# Altium footprint library SamacSys.PcbLib: 1008 footprints (part 61 of 63)
Each footprint in its own frame and in the unit in brackets; x right, y up, seen from the top. Pads: shape width x height; smd on the part's side, far side on the other; paste and mask are expansions set on the pad; w line width, h text height; cw(c..) or ccw(c..) is an arc to the next point about the centre after c.
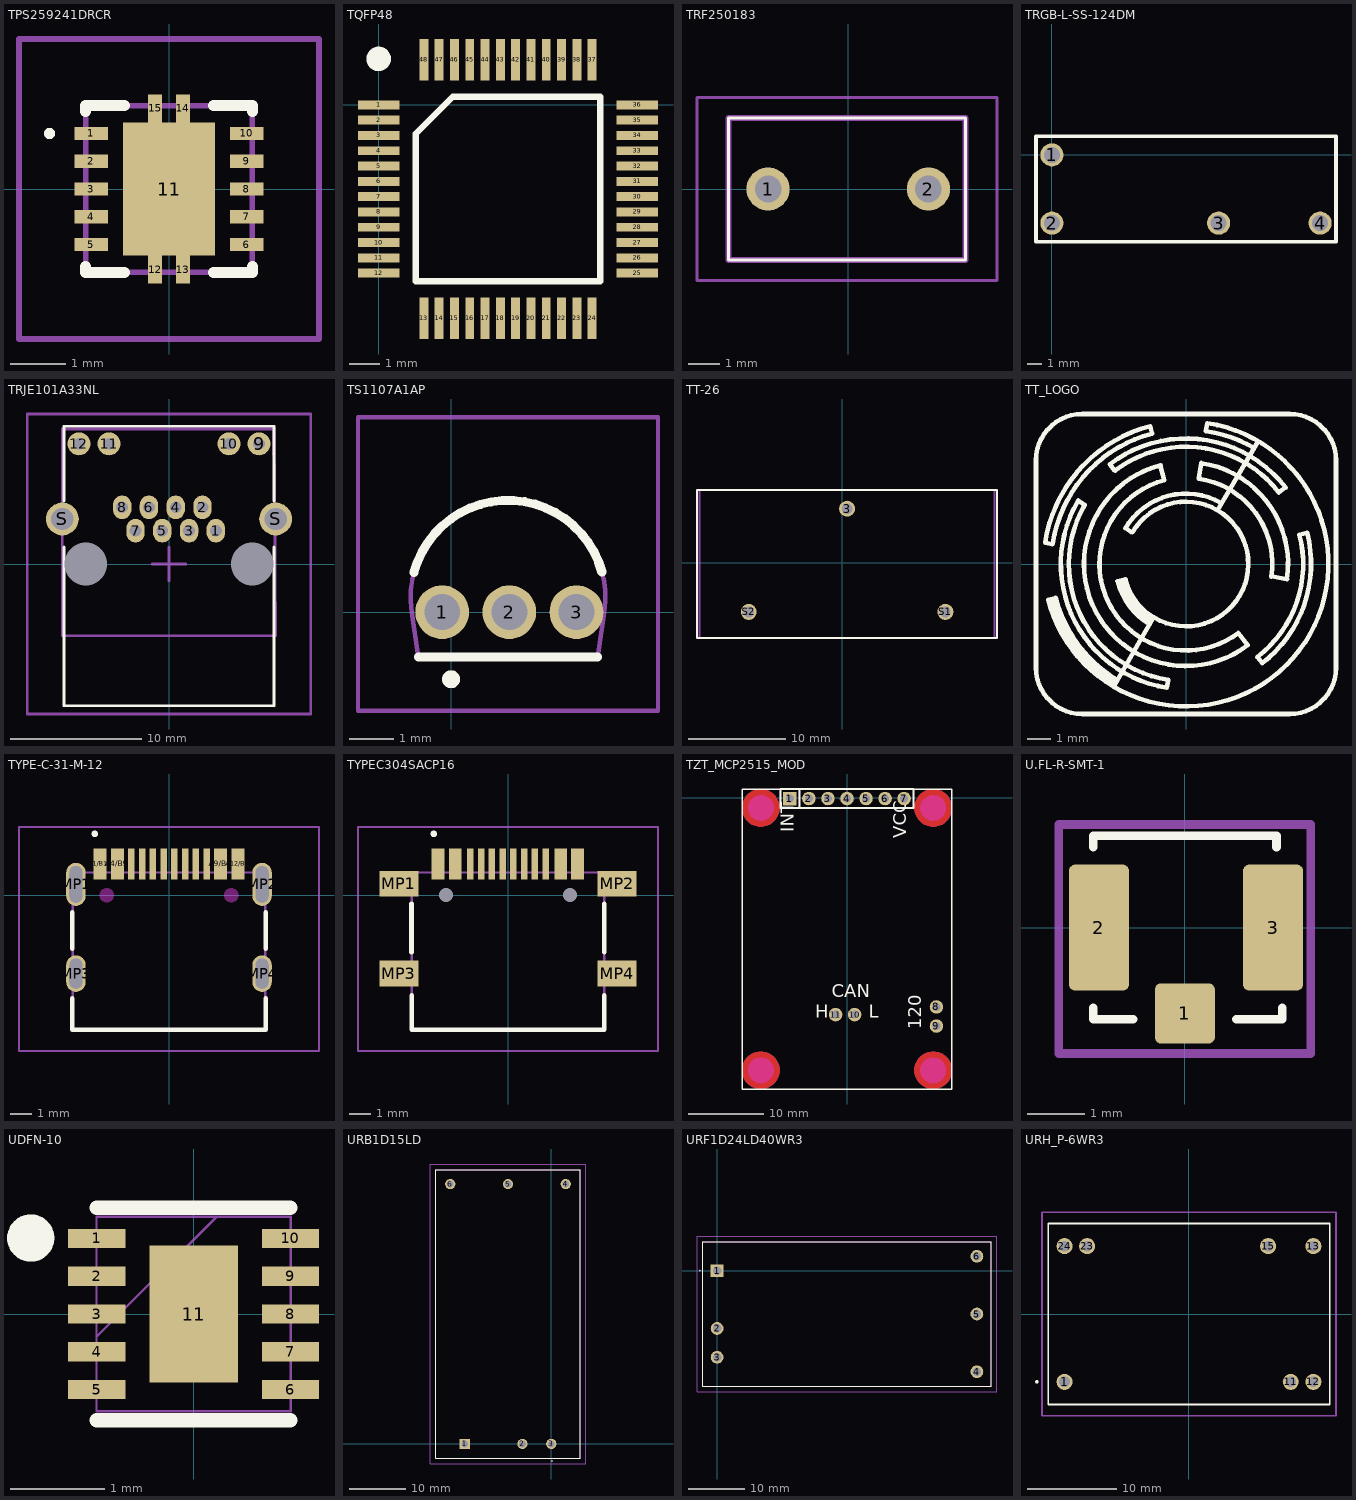
[diagram p60: the footprints below, top view; thin cyan lines are the x and y axes]

## TPS259241DRCR [mm]
pads (15):
  rect 0.6x0.24 smd: 1(-1.4,1) 2(-1.4,0.5) 3(-1.4,0) 4(-1.4,-0.5) 5(-1.4,-1) 6(1.4,-1) 7(1.4,-0.5) 8(1.4,0) 9(1.4,0.5) 10(1.4,1)
  rect 1.65x2.4 smd: 11(0,0)
  rect 0.25x0.5 smd: 12(-0.25,-1.45) 13(0.25,-1.45) 14(0.25,1.45) 15(-0.25,1.45)
Top Overlay:
  lines w0.1: -2.2,1 cw(c-2.15,1) -2.1,1 cw(c-2.15,1) -2.2,1
  lines w0.2: -1.5,-1.4 -1.5,-1.5 -0.8,-1.5 ; -1.5,1.4 -1.5,1.5 -0.8,1.5 ; 0.8,-1.5 1.5,-1.5 1.5,-1.4 ; 0.8,1.5 1.5,1.5 1.5,1.4
Assembly:
  lines w0.1: -1.5,-1.5 -1.5,1.5 1.5,1.5 1.5,-1.5 -1.5,-1.5
Countryard:
  lines w0.1: -2.7,-2.7 -2.7,2.7 2.7,2.7 2.7,-2.7 -2.7,-2.7
3D body "TPS51200DRCT.stp": height 1, standoff 0, extent -1.5,-1.5 1.5,1.5

## TQFP48 [mm]
pads (48):
  rect 1.35x0.29 smd: 1(0,0) 2(0,-0.5) 3(0,-1) 4(0,-1.5) 5(0,-2) 6(0,-2.5) 7(0,-3) 8(0,-3.5) 9(0,-4) 10(0,-4.5) 11(0,-5) 12(0,-5.5) 25(8.45,-5.5) 26(8.45,-5) 27(8.45,-4.5) 28(8.45,-4) 29(8.45,-3.5) 30(8.45,-3) 31(8.45,-2.5) 32(8.45,-2) 33(8.45,-1.5) 34(8.45,-1) 35(8.45,-0.5) 36(8.45,0)
  rect 0.29x1.35 smd: 13(1.475,-6.975) 14(1.975,-6.975) 15(2.475,-6.975) 16(2.975,-6.975) 17(3.475,-6.975) 18(3.975,-6.975) 19(4.475,-6.975) 20(4.975,-6.975) 21(5.475,-6.975) 22(5.975,-6.975) 23(6.475,-6.975) 24(6.975,-6.975) 37(6.975,1.475) 38(6.475,1.475) 39(5.975,1.475) 40(5.475,1.475) 41(4.975,1.475) 42(4.475,1.475) 43(3.975,1.475) 44(3.475,1.475) 45(2.975,1.475) 46(2.475,1.475) 47(1.975,1.475) 48(1.475,1.475)
Top Overlay:
  circle w0.4: c0,1.5 r0.2
  lines w0.2: 1.21,-5.765 7.24,-5.765 7.24,0.265 2.42,0.265 1.21,-0.945 1.21,-5.765
3D body "User Library-P-LQFP48-7x7-0_50.step": height 1.45, standoff 0, extent -0.28,-7.25 8.72,1.75

## TRF250183 [mm]
pads (2):
  round 1.365 hole 0.84: 1(-2.54,0) 2(2.54,0)
Top Overlay:
  lines w0.1: -3.79,-2.25 3.71,-2.25 3.71,2.25 -3.79,2.25 -3.79,-2.25
Assembly:
  lines w0.2: -3.79,-2.25 3.71,-2.25 3.71,2.25 -3.79,2.25 -3.79,-2.25
Countryard:
  lines w0.1: -4.79,-2.9 4.71,-2.9 4.71,2.9 -4.79,2.9 -4.79,-2.9
3D body "TRF250-183.stp": height 10.6, standoff -5, extent -3.79,-1.9 3.71,1.9

## TRGB-L-SS-124DM [mm]
pads (4):
  round 1.6 hole 1.1: 1(0,0) 2(0,-4.7) 3(11.5,-4.7) 4(18.5,-4.7)
Top Overlay:
  lines w0.254: -1.1,-6 -1.1,1.3 19.6,1.3 19.6,-6 -1.1,-6
3D body: height 15.6, standoff 0, extent -1.1,-6 19.6,1.3

## TRJE101A33NL [mm] "Modular Jack"
height 13.55
pads (16):
  oval 1.4x1.8 hole 0.9: 1(3.57,2.54) 2(2.55,4.32) 3(1.53,2.54) 4(0.51,4.32) 5(-0.51,2.54) 6(-1.53,4.32) 7(-2.55,2.54) 8(-3.57,4.32)
  round 1.75 hole 0.9: 9(6.86,9.16) 10(4.57,9.16) 11(-4.57,9.16) 12(-6.86,9.16)
  round 0 hole 3.25 unplated: M(-6.35,0) M(6.35,0)
  round 2.5 hole 1.7: S(-8.125,3.43) S(8.125,3.43)
Top Overlay:
  lines w0.2: -8,1.3 -8,-10.8 8,-10.8 8,1.3 ; -8,4.8 -8,10.5 0,10.5 8,10.5 8,4.8
3D Body:
  lines w0.2: -8.125,-5.46 -8.125,10.29 ; -8,-5.46 8,-5.46 ; -8,10.29 8,10.29 8.125,-5.46
Countryard:
  lines w0.2: -1.27,0 1.27,0 ; 0,-1.27 0,1.27 ; -10.795,-11.43 -10.795,11.43 10.795,11.43 10.795,-11.43 -10.795,-11.43

## TS1107A1AP [mm]
pads (3):
  round 1.2 hole 0.8: 1(-0.2,0) 2(1.3,0) 3(2.8,0)
Top Overlay:
  lines w0.2: -0.831,0.882 cw(c1.271,0.323) 3.369,0.892 ; -0.73,-1 3.27,-1 ; -0.1,-1.5 ccw(c0,-1.5) 0.1,-1.5 ccw(c0,-1.5) -0.1,-1.5
Assembly:
  lines w0.1: -0.88,-0.003 cw(c1.271,0.323) 3.421,0.001 ; -0.88,0 -0.73,-1 3.27,-1 3.42,0
Countryard:
  lines w0.1: -2.08,-2.2 4.62,-2.2 4.62,4.35 -2.08,4.35 -2.08,-2.2
3D body "2n3904.stp": height 4.45, standoff -12.65, extent -1.03,-1.351 3.67,2.35

## TT-26 [mm]
height 26
pads (3):
  round 1.65 hole 1.1: 3(0.508,5.588) S1(10.668,-5.08) S2(-9.652,-5.08)
Top Overlay:
  lines w0.2: -15,-7.75 16,-7.75 16,7.5 -15,7.5 -15,-7.75
Top Assembly:
  lines w0.2: -14.75,-7.75 15.75,-7.75 15.75,7.5 -14.75,7.5 -14.75,-7.75
3D body "Трансформатор тока.stp": height 31.25, standoff -6.25, extent -14.742,-7.634 15.758,7.366

## TT_LOGO [mm]
Top Overlay:
  region: -3.139,-5.315 -3.399,-5.162 -3.887,-4.804 -4.339,-4.401 -4.748,-3.956 -5.112,-3.473 -5.427,-2.956 -5.69,-2.412 -5.899,-1.844 -5.975,-1.551 -5.969,-1.549 -5.664,-1.473 -5.65,-1.468 -5.571,-1.743 -5.374,-2.278 -5.126,-2.792 -4.83,-3.279 -4.487,-3.734 -4.101,-4.154 -3.676,-4.535 -3.216,-4.872 -2.974,-5.023 -2.972,-5.029
  region: -1.569,-2.615 -1.697,-2.539 -1.937,-2.361 -2.158,-2.161 -2.358,-1.94 -2.536,-1.701 -2.69,-1.446 -2.818,-1.176 -2.919,-0.896 -2.956,-0.752 -2.965,-0.739 -2.619,-0.653 -2.625,-0.675 -2.589,-0.802 -2.499,-1.049 -2.386,-1.286 -2.25,-1.512 -2.092,-1.723 -1.915,-1.918 -1.72,-2.094 -1.509,-2.251 -1.398,-2.322 -1.393,-2.318
  lines w0.08: -1.575,-2.622 -1.393,-2.318
  lines w0.2: -6.104,0.922 cw(c0,0) -1.55,5.975 ; -6.096,0.914 -5.791,0.864 ; -5.975,-1.551 ccw(c0,0) -3.139,-5.315 ; -5.969,-1.549 -5.664,-1.473 ; -5.773,0.875 cw(c0,0) -1.475,5.65 ; -5.65,-1.468 ccw(c0,0) -2.974,-5.023 ; -4.675,2.75 ccw(c0,0) -0.827,-5.36 ; -4.674,2.743 -4.394,2.565 ; -4.389,2.558 ccw(c0,0) -0.765,-5.023 ; -3.302,4.318 -3.099,4.064 ; -3.3,4.325 cw(c0,0) 4.316,3.312 ; -3.15,-5.309 ccw(c0,0) 0.922,6.104 ; -3.1,-5.25 -1.4,-2.3 ; -3.072,4.046 cw(c0,0) 4.025,3.1 ; -2.967,-0.74 -2.62,-0.653 ; -2.956,-0.752 ccw(c0,0) -1.569,-2.615 ; -2.626,1.551 cw(c0,0) 1.532,2.637 ; -2.625,-0.675 ccw(c0,0) -1.398,-2.322 ; -2.616,1.549 -2.337,1.372 ; -2.324,1.375 cw(c0,0) -1.382,-2.32 ; -1.549,5.969 -1.473,5.664 ; -1.118,4.267 -0.94,3.632 ; -1.102,4.281 ccw(c0,0) 2.672,-3.521 ; -0.945,3.629 ccw(c0,0) 2.262,-2.991 ; -0.838,-5.359 -0.762,-5.029 ; 0.554,3.699 cw(c0,0) 3.701,-0.546 ; 0.559,3.708 0.66,4.369 ; 0.654,4.374 cw(c0,0) 4.374,-0.654 ; 0.864,5.766 0.914,6.096 ; 0.873,5.761 cw(c0,0) 2.95,5.025 ; 1.372,2.337 3.124,5.309 ; 2.261,-2.997 2.667,-3.505 ; 3.083,-4.035 ccw(c-0.003,0.001) 4.916,1.273 ; 3.099,-4.039 3.302,-4.293 ; 3.3,-4.3 ccw(c0,0) 5.25,1.35 ; 3.708,-0.533 4.369,-0.66 ; 4.013,3.099 4.293,3.302 ; 4.928,1.27 5.232,1.346 ; -6.5,-4.5 ccw(c-4.5,-4.5) -4.5,-6.5 4.5,-6.5 ccw(c4.5,-4.5) 6.5,-4.5 6.5,4.5 ccw(c4.5,4.5) 4.5,6.5 -4.5,6.5 ccw(c-4.5,4.5) -6.5,4.5 -6.5,-4.5

## TYPE-C-31-M-12 [mm]
pads (16):
  rect 0.6x1.45 smd: A1/B12(-3.2,1.446) A4/B9(-2.4,1.446) A9/B4(2.4,1.445) A12/B1(3.2,1.446)
  rect 0.3x1.45 smd: A5(-1.25,1.446) A6(-0.25,1.446) A7(0.25,1.446) A8(1.25,1.446) B5(1.75,1.446) B6(0.75,1.446) B7(-0.75,1.446) B8(-1.75,1.446)
  oval 0.9x2 hole 0.6 slot 1.7 at 90 deg unplated: MP1(-4.325,0.5) MP2(4.325,0.5)
  oval 0.9x1.7 hole 0.6 slot 1.4 at 90 deg unplated: MP3(-4.325,-3.65) MP4(4.325,-3.65)
Top Overlay:
  lines w0.2: -4.5,-4.8 -4.5,-6.25 4.47,-6.25 ; -4.47,-6.25 4.5,-6.25 4.5,-4.8 ; -3.5,2.848 ccw(c-3.45,2.848) -3.4,2.848 ; -3.5,2.848 cw(c-3.45,2.848) -3.4,2.848 ; -3.5,2.848 ccw(c-3.45,2.848) -3.4,2.848 ; -4.5,-2.5 -4.5,-0.8 -4.5,-2.5 ; 4.5,-2.5 4.5,-0.8 4.5,-2.5
Keep-Out Layer:
  board cut-out: 2.565,0 2.565,-0.065 2.614,-0.184 2.706,-0.276 2.825,-0.325 2.89,-0.325 2.955,-0.325 3.074,-0.276 3.166,-0.184 3.215,-0.065 3.215,0 3.215,0.065 3.166,0.184 3.074,0.276 2.955,0.325 2.89,0.325 2.825,0.325 2.706,0.276 2.614,0.184 2.565,0.065
  board cut-out: -2.565,0 -2.565,0.065 -2.614,0.184 -2.706,0.276 -2.825,0.325 -2.89,0.325 -2.955,0.325 -3.074,0.276 -3.166,0.184 -3.215,0.065 -3.215,0 -3.215,-0.065 -3.166,-0.184 -3.074,-0.276 -2.955,-0.325 -2.89,-0.325 -2.825,-0.325 -2.706,-0.276 -2.614,-0.184 -2.565,-0.065
Assembly:
  lines w0.1: -4.47,-6.25 4.47,-6.25 4.47,1.05 -4.47,1.05 -4.47,-6.25
Countryard:
  lines w0.1: -6.97,-7.25 6.97,-7.25 ; -6.97,-7.25 -6.97,3.17 ; -6.97,-7.25 6.97,-7.25 ; -6.97,-7.25 -6.97,3.17 ; -6.97,3.17 6.97,3.17 ; -6.97,3.17 6.97,3.17 ; 6.97,-7.25 6.97,3.17 ; 6.97,-7.25 6.97,3.17
3D body "TYPEC-304S-ACP16.stp": height 3.31, standoff -1.7, extent -5.85,-6.25 5.85,2.141

## TYPEC304SACP16 [mm]
pads (22):
  rect 0.3x1.45 smd: A1(-3.4,1.446) A4(-2.6,1.446) A5(-1.25,1.446) A6(-0.25,1.446) A7(0.25,1.446) A8(1.25,1.446) A9(2.6,1.445) A12(3.375,1.446) B1(3.075,1.446) B4(2.3,1.446) B5(1.75,1.446) B6(0.75,1.446) B7(-0.75,1.446) B8(-1.75,1.446) B9(-2.3,1.446) B12(-3.1,1.445)
  round 0.325 hole 0.65 unplated: MH1(-2.89,0) MH2(2.89,0)
  rect 1.8x1.2 smd: MP1(-5.07,0.53) MP2(5.07,0.53) MP3(-5.07,-3.65) MP4(5.07,-3.65)
Top Overlay:
  lines w0.2: -4.47,-6.25 4.47,-6.25 ; -4.47,-6.25 4.47,-6.25 ; -4.47,-6.25 -4.47,-4.652 -4.47,-6.25 ; -3.5,2.848 ccw(c-3.45,2.848) -3.4,2.848 ; -3.5,2.848 cw(c-3.45,2.848) -3.4,2.848 ; -3.5,2.848 ccw(c-3.45,2.848) -3.4,2.848 ; 4.47,-6.25 4.47,-4.652 4.47,-6.25 ; -4.5,-2.652 -4.5,-0.402 -4.47,-0.402 -4.47,-2.652 -4.5,-2.652 ; 4.47,-2.652 4.47,-0.402 4.47,-2.652
Assembly:
  lines w0.1: -4.47,-6.25 4.47,-6.25 4.47,1.05 -4.47,1.05 -4.47,-6.25
Countryard:
  lines w0.1: -6.97,-7.25 6.97,-7.25 ; -6.97,-7.25 -6.97,3.17 ; -6.97,-7.25 6.97,-7.25 ; -6.97,-7.25 -6.97,3.17 ; -6.97,3.17 6.97,3.17 ; -6.97,3.17 6.97,3.17 ; 6.97,-7.25 6.97,3.17 ; 6.97,-7.25 6.97,3.17
3D body "TYPEC-304S-ACP16.stp": height 3.31, standoff -1.7, extent -5.85,-6.25 5.85,2.141

## TZT_MCP2515_MOD [mm] "PBS-7 + 2xPBS-2"
height 10
pads (11):
  rect 1.8x1.8 hole 1.1: 1(-7.62,-0.127)
  round 1.8 hole 1.1: 2(-5.08,-0.127) 3(-2.54,-0.127) 4(0,-0.127) 5(2.54,-0.127) 6(5.08,-0.127) 7(7.62,-0.127) 8(11.938,-27.94) 9(11.938,-30.48) 10(1.016,-28.956) 11(-1.524,-28.956)
Top Layer:
  pour cut-out: 9,-36.381 9,-36.627 9.096,-37.11 9.285,-37.565 9.558,-37.975 9.906,-38.323 10.316,-38.596 10.771,-38.785 11.254,-38.881 11.5,-38.881 11.746,-38.881 12.229,-38.785 12.684,-38.596 13.094,-38.323 13.442,-37.975 13.715,-37.565 13.904,-37.11 14,-36.627 14,-36.381 14,-36.135 13.904,-35.652 13.715,-35.197 13.442,-34.787 13.094,-34.439 12.684,-34.166 12.229,-33.977 11.746,-33.881 11.5,-33.881 11.254,-33.881 10.771,-33.977 10.316,-34.166 9.906,-34.439 9.558,-34.787 9.285,-35.197 9.096,-35.652 9,-36.135
  pour cut-out: -14,-36.381 -14,-36.627 -13.904,-37.11 -13.715,-37.565 -13.442,-37.975 -13.094,-38.323 -12.684,-38.596 -12.229,-38.785 -11.746,-38.881 -11.5,-38.881 -11.254,-38.881 -10.771,-38.785 -10.316,-38.596 -9.906,-38.323 -9.558,-37.975 -9.285,-37.565 -9.096,-37.11 -9,-36.627 -9,-36.381 -9,-36.135 -9.096,-35.652 -9.285,-35.197 -9.558,-34.787 -9.906,-34.439 -10.316,-34.166 -10.771,-33.977 -11.254,-33.881 -11.5,-33.881 -11.746,-33.881 -12.229,-33.977 -12.684,-34.166 -13.094,-34.439 -13.442,-34.787 -13.715,-35.197 -13.904,-35.652 -14,-36.135
  pour cut-out: -14,-1.381 -14,-1.627 -13.904,-2.11 -13.715,-2.565 -13.442,-2.975 -13.094,-3.323 -12.684,-3.596 -12.229,-3.785 -11.746,-3.881 -11.5,-3.881 -11.254,-3.881 -10.771,-3.785 -10.316,-3.596 -9.906,-3.323 -9.558,-2.975 -9.285,-2.565 -9.096,-2.11 -9,-1.627 -9,-1.381 -9,-1.135 -9.096,-0.652 -9.285,-0.197 -9.558,0.213 -9.906,0.561 -10.316,0.834 -10.771,1.023 -11.254,1.119 -11.5,1.119 -11.746,1.119 -12.229,1.023 -12.684,0.834 -13.094,0.561 -13.442,0.213 -13.715,-0.197 -13.904,-0.652 -14,-1.135
  pour cut-out: 9,-1.381 9,-1.627 9.096,-2.11 9.285,-2.565 9.558,-2.975 9.906,-3.323 10.316,-3.596 10.771,-3.785 11.254,-3.881 11.5,-3.881 11.746,-3.881 12.229,-3.785 12.684,-3.596 13.094,-3.323 13.442,-2.975 13.715,-2.565 13.904,-2.11 14,-1.627 14,-1.381 14,-1.135 13.904,-0.652 13.715,-0.197 13.442,0.213 13.094,0.561 12.684,0.834 12.229,1.023 11.746,1.119 11.5,1.119 11.254,1.119 10.771,1.023 10.316,0.834 9.906,0.561 9.558,0.213 9.285,-0.197 9.096,-0.652 9,-1.135
Bottom Layer:
  pour cut-out: 9,-36.381 9,-36.627 9.096,-37.11 9.285,-37.565 9.558,-37.975 9.906,-38.323 10.316,-38.596 10.771,-38.785 11.254,-38.881 11.5,-38.881 11.746,-38.881 12.229,-38.785 12.684,-38.596 13.094,-38.323 13.442,-37.975 13.715,-37.565 13.904,-37.11 14,-36.627 14,-36.381 14,-36.135 13.904,-35.652 13.715,-35.197 13.442,-34.787 13.094,-34.439 12.684,-34.166 12.229,-33.977 11.746,-33.881 11.5,-33.881 11.254,-33.881 10.771,-33.977 10.316,-34.166 9.906,-34.439 9.558,-34.787 9.285,-35.197 9.096,-35.652 9,-36.135
  pour cut-out: -14,-36.381 -14,-36.627 -13.904,-37.11 -13.715,-37.565 -13.442,-37.975 -13.094,-38.323 -12.684,-38.596 -12.229,-38.785 -11.746,-38.881 -11.5,-38.881 -11.254,-38.881 -10.771,-38.785 -10.316,-38.596 -9.906,-38.323 -9.558,-37.975 -9.285,-37.565 -9.096,-37.11 -9,-36.627 -9,-36.381 -9,-36.135 -9.096,-35.652 -9.285,-35.197 -9.558,-34.787 -9.906,-34.439 -10.316,-34.166 -10.771,-33.977 -11.254,-33.881 -11.5,-33.881 -11.746,-33.881 -12.229,-33.977 -12.684,-34.166 -13.094,-34.439 -13.442,-34.787 -13.715,-35.197 -13.904,-35.652 -14,-36.135
  pour cut-out: -14,-1.381 -14,-1.627 -13.904,-2.11 -13.715,-2.565 -13.442,-2.975 -13.094,-3.323 -12.684,-3.596 -12.229,-3.785 -11.746,-3.881 -11.5,-3.881 -11.254,-3.881 -10.771,-3.785 -10.316,-3.596 -9.906,-3.323 -9.558,-2.975 -9.285,-2.565 -9.096,-2.11 -9,-1.627 -9,-1.381 -9,-1.135 -9.096,-0.652 -9.285,-0.197 -9.558,0.213 -9.906,0.561 -10.316,0.834 -10.771,1.023 -11.254,1.119 -11.5,1.119 -11.746,1.119 -12.229,1.023 -12.684,0.834 -13.094,0.561 -13.442,0.213 -13.715,-0.197 -13.904,-0.652 -14,-1.135
  pour cut-out: 9,-1.381 9,-1.627 9.096,-2.11 9.285,-2.565 9.558,-2.975 9.906,-3.323 10.316,-3.596 10.771,-3.785 11.254,-3.881 11.5,-3.881 11.746,-3.881 12.229,-3.785 12.684,-3.596 13.094,-3.323 13.442,-2.975 13.715,-2.565 13.904,-2.11 14,-1.627 14,-1.381 14,-1.135 13.904,-0.652 13.715,-0.197 13.442,0.213 13.094,0.561 12.684,0.834 12.229,1.023 11.746,1.119 11.5,1.119 11.254,1.119 10.771,1.023 10.316,0.834 9.906,0.561 9.558,0.213 9.285,-0.197 9.096,-0.652 9,-1.135
Top Overlay:
  lines w0.2: -14,-38.881 14,-38.881 14,1.119 9.25,1.119 -14,1.119 -14,-38.881
  lines w0.25: -6.35,-1.397 -6.35,1.143 ; -8.89,-1.397 -8.89,1.143 8.89,1.143 8.89,-1.397 -8.89,-1.397
  text "INT" at -6.514,-4.603 h3
  text "VCC" at 8.486,-5.454 h3
  text "120" at 10.486,-30.94 h3
  text "L" at 2.879,-29.99 h3
  text "H" at -4.259,-29.99 h3
  text "CAN" at -2.018,-27.24 h3
Keep-Out Layer:
  board cut-out: 9.8,-1.381 9.8,-1.548 9.865,-1.877 9.993,-2.186 10.18,-2.465 10.416,-2.701 10.695,-2.888 11.004,-3.016 11.333,-3.081 11.5,-3.081 11.667,-3.081 11.996,-3.016 12.305,-2.888 12.584,-2.701 12.82,-2.465 13.007,-2.186 13.135,-1.877 13.2,-1.548 13.2,-1.381 13.2,-1.214 13.135,-0.885 13.007,-0.576 12.82,-0.297 12.584,-0.061 12.305,0.126 11.996,0.254 11.667,0.319 11.5,0.319 11.333,0.319 11.004,0.254 10.695,0.126 10.416,-0.061 10.18,-0.297 9.993,-0.576 9.865,-0.885 9.8,-1.214
  board cut-out: -13.2,-1.381 -13.2,-1.548 -13.135,-1.877 -13.007,-2.186 -12.82,-2.465 -12.584,-2.701 -12.305,-2.888 -11.996,-3.016 -11.667,-3.081 -11.5,-3.081 -11.333,-3.081 -11.004,-3.016 -10.695,-2.888 -10.416,-2.701 -10.18,-2.465 -9.993,-2.186 -9.865,-1.877 -9.8,-1.548 -9.8,-1.381 -9.8,-1.214 -9.865,-0.885 -9.993,-0.576 -10.18,-0.297 -10.416,-0.061 -10.695,0.126 -11.004,0.254 -11.333,0.319 -11.5,0.319 -11.667,0.319 -11.996,0.254 -12.305,0.126 -12.584,-0.061 -12.82,-0.297 -13.007,-0.576 -13.135,-0.885 -13.2,-1.214
  board cut-out: -13.2,-36.381 -13.2,-36.548 -13.135,-36.877 -13.007,-37.186 -12.82,-37.465 -12.584,-37.701 -12.305,-37.888 -11.996,-38.016 -11.667,-38.081 -11.5,-38.081 -11.333,-38.081 -11.004,-38.016 -10.695,-37.888 -10.416,-37.701 -10.18,-37.465 -9.993,-37.186 -9.865,-36.877 -9.8,-36.548 -9.8,-36.381 -9.8,-36.214 -9.865,-35.885 -9.993,-35.576 -10.18,-35.297 -10.416,-35.061 -10.695,-34.874 -11.004,-34.746 -11.333,-34.681 -11.5,-34.681 -11.667,-34.681 -11.996,-34.746 -12.305,-34.874 -12.584,-35.061 -12.82,-35.297 -13.007,-35.576 -13.135,-35.885 -13.2,-36.214
  board cut-out: 9.8,-36.381 9.8,-36.548 9.865,-36.877 9.993,-37.186 10.18,-37.465 10.416,-37.701 10.695,-37.888 11.004,-38.016 11.333,-38.081 11.5,-38.081 11.667,-38.081 11.996,-38.016 12.305,-37.888 12.584,-37.701 12.82,-37.465 13.007,-37.186 13.135,-36.877 13.2,-36.548 13.2,-36.381 13.2,-36.214 13.135,-35.885 13.007,-35.576 12.82,-35.297 12.584,-35.061 12.305,-34.874 11.996,-34.746 11.667,-34.681 11.5,-34.681 11.333,-34.681 11.004,-34.746 10.695,-34.874 10.416,-35.061 10.18,-35.297 9.993,-35.576 9.865,-35.885 9.8,-36.214
Assembly:
  lines w0.1: -6.35,-1.397 -6.35,1.143 ; -8.89,-1.397 -8.89,1.143 8.89,1.143 8.89,-1.397 -8.89,-1.397
Countryard:
  lines w0.1: -1.016,-0.127 1.016,-0.127 ; 0,-1.127 0,0.889 ; -8.89,-1.397 -8.89,1.143 8.89,1.143 8.89,-1.397 -8.89,-1.397
3D body "MCP2515 CAN_SPI.stp": height 15.04, standoff 1.54, extent -14,-39.004 14,1.119
3D body "User Library-PBS_(DS1023)_1line_connectors_h=5_0_8_5mm_step_2_54mm (5).step": height 8.5, standoff -3, extent -9.14,-1.397 9.14,1.103
3D body "User Library-PBS_(DS1023)_1line_connectors_h=5_0_8_5mm_step_2_54mm (4).step": height 8.5, standoff -3, extent -3.044,-30.186 2.536,-27.686
3D body "User Library-PBS_(DS1023)_1line_connectors_h=5_0_8_5mm_step_2_54mm (4).step": height 8.5, standoff -3, extent 10.708,-32 13.208,-26.42

## U.FL-R-SMT-1 [mm] "U.FL connector"
height 1.5
pads (3):
  rrect20% 1.05x1.05 smd: 1(0,-1.5)
  rrect20% 1.05x2.2 smd: 2(-1.5,0) 3(1.54,0)
Top Overlay:
  lines w0.15: -1.6,-1.4 -1.6,-1.6 -0.9,-1.6 ; -1.6,1.4 -1.6,1.6 1.6,1.6 1.6,1.4 ; 0.9,-1.6 1.7,-1.6 1.7,-1.4
Top Courtyard:
  lines w0.15: -2.2,-2.2 2.2,-2.2 2.2,1.8 -2.2,1.8 -2.2,-2.2
3D body "u.Fl Antenna Connector - 523-A-1JB.STEP": height 1.25, standoff 0, extent -1.5,-1.55 1.5,1.55

## UDFN-10 [mm] "Microchip Thin MLF"
height 0.55
pads (11):
  rect 0.605x0.204 smd paste+0 mask+0: 1(-1.026,0.8) 2(-1.026,0.4) 3(-1.026,0) 4(-1.026,-0.4) 5(-1.026,-0.8) 6(1.026,-0.8) 7(1.026,-0.4) 8(1.026,0) 9(1.026,0.4) 10(1.026,0.8)
  rect 0.94x1.448 smd paste+0 mask+0: 11(0,0)
Top Overlay:
  circle w0.25: c-1.725,0.805 r0.125
  lines w0.152: -1.025,-1.125 1.025,-1.125 ; -1.025,1.125 1.025,1.125
Assembly:
  lines w0.025: -1.029,-0.241 0.241,1.029 ; -1.029,-1.029 -1.029,1.029 1.029,1.029 1.029,-1.029 -1.029,-1.029 ; -1.029,-0.927 -1.029,-0.673 -1.029,-0.927 ; -1.029,-0.527 -1.029,-0.273 -1.029,-0.527 ; -1.029,-0.127 -1.029,0.127 -1.029,-0.127 ; -1.029,0.273 -1.029,0.527 -1.029,0.273 ; -1.029,0.673 -1.029,0.927 -1.029,0.673 ; 1.029,-0.927 1.029,-0.673 1.029,-0.927 ; 1.029,-0.527 1.029,-0.273 1.029,-0.527 ; 1.029,-0.127 1.029,0.127 1.029,-0.127 ; 1.029,0.273 1.029,0.527 1.029,0.273 ; 1.029,0.673 1.029,0.927 1.029,0.673
3D body: height 0.25, standoff 0, extent 0,0 0.254,0.254
3D body "MLF-10_MT_MCH.step": height 0.61, standoff 0, extent -1.029,-1.029 1.029,1.029

## URB1D15LD [mm]
pads (6):
  rect 1.8x1.8 hole 1.2: 1(-15.24,0)
  round 1.8 hole 1.2: 2(-5.08,0) 3(0,0) 4(2.54,45.72) 5(-7.62,45.72) 6(-17.78,45.72)
Top Overlay:
  lines w0.1: 0.1,-3.1 ccw(c0.1,-3.05) 0.1,-3 ccw(c0.1,-3.05) 0.1,-3.1
  lines w0.2: -20.32,-2.54 -20.32,48.26 5.08,48.26 5.08,-2.54 -20.32,-2.54
Assembly:
  lines w0.1: -20.32,-2.54 -20.32,48.26 5.08,48.26 5.08,-2.54 -20.32,-2.54
Countryard:
  lines w0.1: -21.32,-3.54 6.08,-3.54 6.08,49.26 -21.32,49.26 -21.32,-3.54
3D body "RSDW40H-24.stp": height 10.95, standoff -5, extent -20.32,-2.54 5.08,48.26

## URF1D24LD40WR3 [mm]
pads (6):
  rect 2.25x2.25 hole 1.5: 1(0,0)
  round 2.25 hole 1.5: 2(0,-10.16) 3(0,-15.24) 4(45.72,-17.78) 5(45.72,-7.62) 6(45.72,2.54)
Top Overlay:
  lines w0.1: -3.1,0 cw(c-3.05,0) -3,0 cw(c-3.05,0) -3.1,0
  lines w0.2: -2.54,-20.32 48.26,-20.32 48.26,5.08 -2.54,5.08 -2.54,-20.32
Assembly:
  lines w0.1: -2.54,-20.32 48.26,-20.32 48.26,5.08 -2.54,5.08 -2.54,-20.32
Countryard:
  lines w0.1: -3.54,-21.32 49.26,-21.32 49.26,6.08 -3.54,6.08 -3.54,-21.32
3D body "URF1D24LD-40WR3.stp": height 12.4, standoff -5, extent -2.54,-20.32 48.26,5.08

## URH_P-6WR3 [mm] "MORNSUN DCDC"
height 10.2
pads (7):
  round 1.8 hole 1.2: 1(-13.97,-7.62) 11(11.43,-7.62) 12(13.97,-7.62) 13(13.97,7.62) 15(8.89,7.62) 23(-11.43,7.62) 24(-13.97,7.62)
Top Overlay:
  lines w0.2: -15.8,10.16 -15.8,-10.16 15.8,-10.16 15.8,10.16 ; -15.8,10.16 15.8,10.16 ; -15.8,10.16 15.8,10.16 ; -17.17,-7.62 ccw(c-17.07,-7.62) -16.97,-7.62 ccw(c-17.07,-7.62) -17.17,-7.62
Assembly:
  lines w0.2: -16.51,-11.43 -16.51,11.43 16.51,11.43 16.51,-11.43 -16.51,-11.43
Countryard:
  lines w0.1: -16.51,-11.43 -16.51,11.43 16.51,11.43 16.51,-11.43 -16.51,-11.43